# Altium footprint library INS.PcbLib: 7 footprints
Each footprint in its own frame and in the unit in brackets; x right, y up, seen from the top. Pads: shape width x height; smd on the part's side, far side on the other; paste and mask are expansions set on the pad; w line width, h text height; cw(c..) or ccw(c..) is an arc to the next point about the centre after c.
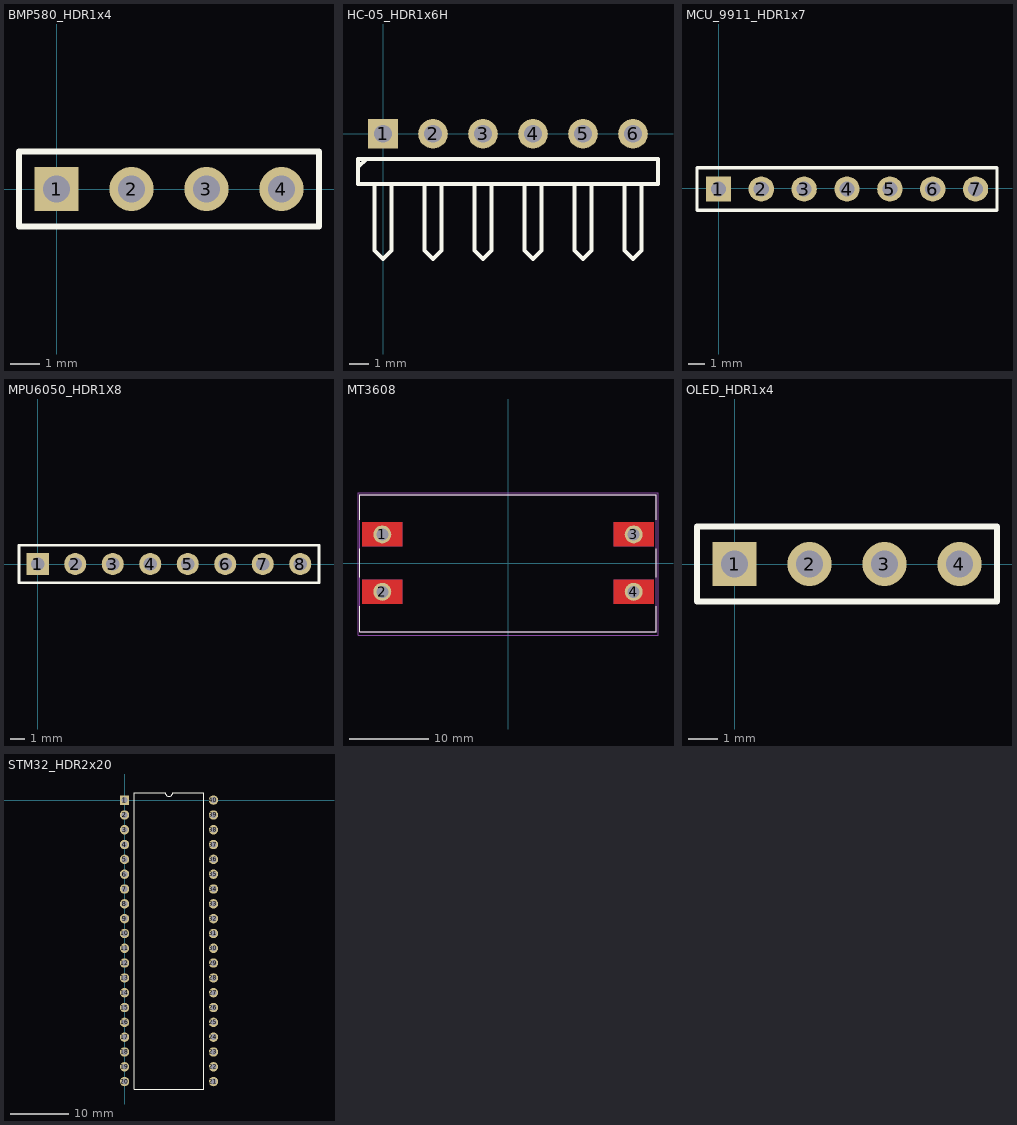
[diagram p0: the footprints below, top view; thin cyan lines are the x and y axes]

## BMP580_HDR1x4 [mm]
pads (4):
  rect 1.5x1.5 hole 0.9: 1(0,0)
  round 1.5 hole 0.9: 2(2.54,0) 3(5.08,0) 4(7.62,0)
Top Overlay:
  lines w0.2: -1.27,-1.27 -1.27,1.27 8.89,1.27 8.89,-1.27 -1.27,-1.27
3D body "4-Pin Header - Male - 2.54mm.step": height 8.89, standoff -3.05, extent -1.27,-1.27 8.89,1.27

## HC-05_HDR1x6H [mm]
pads (6):
  rect 1.5x1.5 hole 0.9: 1(0,0)
  round 1.5 hole 0.9: 2(2.54,0) 3(5.08,0) 4(7.62,0) 5(10.16,0) 6(12.7,0)
Top Overlay:
  lines w0.2: -1.27,-1.693 -0.847,-1.27 ; -0.423,-2.54 -0.423,-5.927 0,-6.35 0.423,-5.927 0.423,-2.54 ; 2.117,-2.54 2.117,-5.927 2.54,-6.35 2.963,-5.927 2.963,-2.54 ; 4.657,-2.54 4.657,-5.927 5.08,-6.35 5.503,-5.927 5.503,-2.54 ; 7.197,-2.54 7.197,-5.927 7.62,-6.35 8.043,-5.927 8.043,-2.54 ; 9.737,-2.54 9.737,-5.927 10.16,-6.35 10.583,-5.927 10.583,-2.54 ; 12.277,-2.54 12.277,-5.927 12.7,-6.35 13.123,-5.927 13.123,-2.54 ; -1.27,-2.54 13.97,-2.54 13.97,-1.27 -1.27,-1.27 -1.27,-2.54
3D body "H254_90deg_6pin.STEP": height 2.55, standoff -3.58, extent -1.27,-10.224 13.97,0.127

## MCU_9911_HDR1x7 [mm]
pads (7):
  rect 1.5x1.5 hole 0.9: 1(-0.009,-0.034)
  round 1.5 hole 0.9: 2(2.531,-0.034) 3(5.071,-0.034) 4(7.611,-0.034) 5(10.151,-0.034) 6(12.691,-0.034) 7(15.231,-0.034)
Top Overlay:
  lines w0.2: -1.279,-1.304 -1.279,1.236 16.501,1.236 16.501,-1.304 -1.279,-1.304

## MPU6050_HDR1X8 [mm] "Connector; Header; 8 Position"
pads (8):
  rect 1.5x1.5 hole 0.9: 1(0,0)
  round 1.5 hole 0.9: 2(2.54,0) 3(5.08,0) 4(7.62,0) 5(10.16,0) 6(12.7,0) 7(15.24,0) 8(17.78,0)
Top Overlay:
  lines w0.2: -1.27,-1.27 -1.27,1.27 19.05,1.27 19.05,-1.27 -1.27,-1.27
3D body "MPU6050.stp": height 6.07, standoff -5.11, extent -1.664,-14.605 19.444,1.27

## MT3608 [mm] "DC-DC"
height 6.45
pads (4):
  round 2.25 hole 1.5 mask+0: 1(-15.775,3.6) 2(-15.775,-3.6) 3(15.775,3.6) 4(15.775,-3.6)
Top Layer:
  region: 18.275,2.1 13.275,2.1 13.275,5.1 18.275,5.1
  region: 18.275,-5.1 13.275,-5.1 13.275,-2.1 18.275,-2.1
  region: -13.275,-5.1 -18.275,-5.1 -18.275,-2.1 -13.275,-2.1
  region: -13.275,2.1 -18.275,2.1 -18.275,5.1 -13.275,5.1
Bottom Layer:
  region: 18.275,2.1 13.275,2.1 13.275,5.1 18.275,5.1
  region: 18.275,-5.1 13.275,-5.1 13.275,-2.1 18.275,-2.1
  region: -13.275,-5.1 -18.275,-5.1 -18.275,-2.1 -13.275,-2.1
  region: -13.275,2.1 -18.275,2.1 -18.275,5.1 -13.275,5.1
Top Overlay:
  lines w0.127: -18.575,-5.42 -18.575,-8.6 18.575,-8.6 18.575,-5.42 ; -18.575,-1.78 -18.575,1.78 ; -18.575,5.42 -18.575,8.6 18.575,8.6 18.575,5.42 ; 18.575,-1.78 18.575,1.78
Top Solder:
  region: 18.375,2 13.175,2 13.175,5.2 18.375,5.2
  region: 18.375,-5.2 13.175,-5.2 13.175,-2 18.375,-2
  region: -13.175,-5.2 -18.375,-5.2 -18.375,-2 -13.175,-2
  region: -13.175,2 -18.375,2 -18.375,5.2 -13.175,5.2
Bottom Solder:
  region: 18.375,2 13.175,2 13.175,5.2 18.375,5.2
  region: 18.375,-5.2 13.175,-5.2 13.175,-2 18.375,-2
  region: -13.175,-5.2 -18.375,-5.2 -18.375,-2 -13.175,-2
  region: -13.175,2 -18.375,2 -18.375,5.2 -13.175,5.2
Mechanical 13:
  lines w0.127: -18.575,-8.6 -18.575,8.6 18.575,8.6 18.575,-8.6 -18.575,-8.6
  text "VOUT_N" at -18,-7 h1.27
  text "VOUT_P" at -18,5.75 h1.27
  text "VIN_N" at 13,-7 h1.27
  text "VIN_P" at 13,5.75 h1.27
Mechanical 15:
  lines w0.05: -18.825,-9.075 -18.825,8.85 18.825,8.85 18.825,-9.075 -18.825,-9.075
3D body "MT3608 Converter.STEP": height 6.45, standoff -0.85, extent -18.575,-8.825 18.575,8.6

## OLED_HDR1x4 [mm]
pads (4):
  rect 1.5x1.5 hole 0.9: 1(0,0)
  round 1.5 hole 0.9: 2(2.54,0) 3(5.08,0) 4(7.62,0)
Top Overlay:
  lines w0.2: -1.27,-1.27 -1.27,1.27 8.89,1.27 8.89,-1.27 -1.27,-1.27
3D body "4-Pin Header - Male - 2.54mm.step": height 8.89, standoff -3.05, extent -1.27,-1.27 8.89,1.27

## STM32_HDR2x20 [mm]
pads (40):
  rect 1.6x1.6 hole 1: 1(0,0)
  round 1.6 hole 1: 2(0,-2.54) 3(0,-5.08) 4(0,-7.62) 5(0,-10.16) 6(0,-12.7) 7(0,-15.24) 8(0,-17.78) 9(0,-20.32) 10(0,-22.86) 11(0,-25.4) 12(0,-27.94) 13(0,-30.48) 14(0,-33.02) 15(0,-35.56) 16(0,-38.1) 17(0,-40.64) 18(0,-43.18) 19(0,-45.72) 20(0,-48.26) 21(15.24,-48.26) 22(15.24,-45.72) 23(15.24,-43.18) 24(15.24,-40.64) 25(15.24,-38.1) 26(15.24,-35.56) 27(15.24,-33.02) 28(15.24,-30.48) 29(15.24,-27.94) 30(15.24,-25.4) 31(15.24,-22.86) 32(15.24,-20.32) 33(15.24,-17.78) 34(15.24,-15.24) 35(15.24,-12.7) 36(15.24,-10.16) 37(15.24,-7.62) 38(15.24,-5.08) 39(15.24,-2.54) 40(15.24,0)
Top Overlay:
  lines w0.2: 1.635,-49.53 1.635,1.27 6.985,1.27 ccw(c7.62,1.27) 8.255,1.27 13.605,1.27 13.605,-49.53 1.635,-49.53
3D body "20-Pin Header - Female - 2.54mm.step": height 5, standoff -3, extent -1.25,-49.78 1.25,1.52
3D body "20-Pin Header - Female - 2.54mm.step": height 5, standoff -3, extent 13.99,-49.78 16.49,1.52